# EAGLE library part RJE091884111A (library RJE091884111A)
Modular Jacks - Single port, 8P8C, R/A, shielded, Tab down, without LED Source: Datasheet <https://cdn.amphenol-cs.com/media/wysiwyg/files/drawing/p-rje09-188-4111a.pdf>
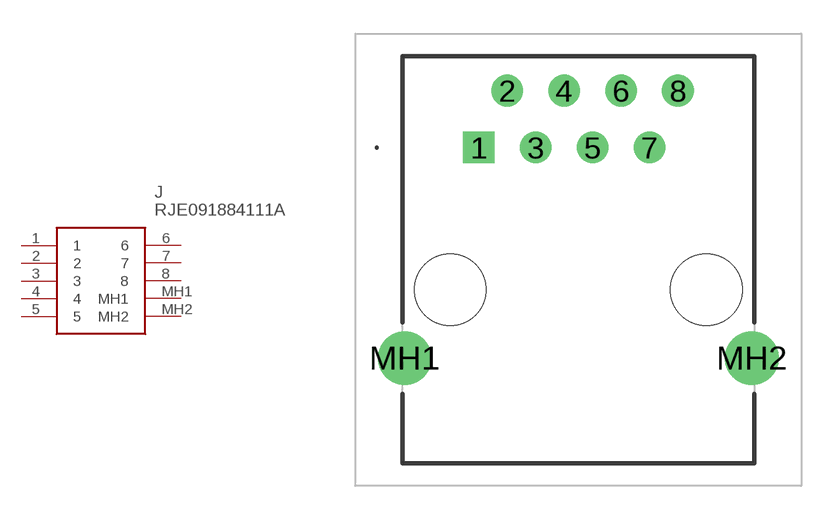
[diagram p0: symbol with the pads of RJE091884111A; footprint RJE091884111A]

Designator prefix J

## RJE091884111A (Description: Modular Jacks - Single port, 8P8C, R/A, shielded, Tab down, without LED; Height: 13.4mm; Manufacturer_Name: Amphenol Communications Solutions; Manufacturer_Part_Number: RJE091884111A)  [RJE091884111A]
1  1
2  2
3  3
4  4
5  5
6  6
7  7
8  8
MH1  MH1
MH2  MH2

## Footprint RJE091884111A (pad centres in mm)
RJE091884111A-1
drill 0.9 pad 1.4 square: 1 0,0
drill 0.9 pad 1.4: 2 1.27,2.54; 3 2.54,0; 4 3.81,2.54; 5 5.08,0; 6 6.35,2.54; 7 7.62,0; 8 8.89,2.54
drill 1.6 pad 2.4: MH1 -3.305,-9.4; MH2 12.195,-9.4
hole 3.2 at -1.27,-6.35
hole 3.2 at 10.16,-6.35